# Altium integrated library SM8S36A.IntLib: 1 symbol
Pins are listed as number, name and electrical type; pins without a type are passive.

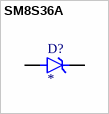
[diagram p0: symbol SM8S36A]

## SM8S36A
designator D?
MP: SM8S36A; Package: None; Price: None; Value: *; Availability: Unavailable
footprint TVSP_SM8S36A
pins: 1 K, 2 A